# Altium footprint library 1437566-3.PcbLib: 1 footprints
Each footprint in its own frame and in the unit in brackets; x right, y up, seen from the top. Pads: shape width x height; smd on the part's side, far side on the other; paste and mask are expansions set on the pad; w line width, h text height; cw(c..) or ccw(c..) is an arc to the next point about the centre after c.
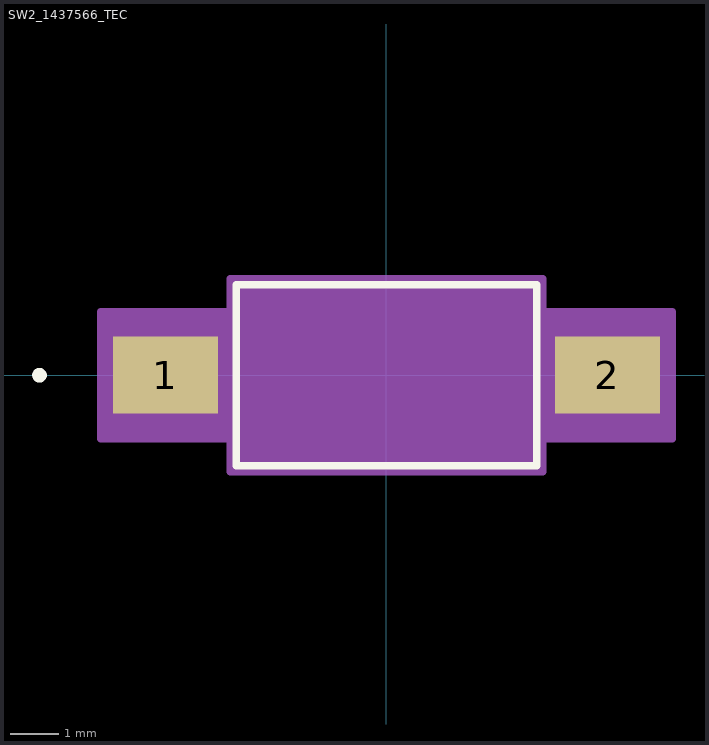
[diagram p0: the footprint, top view; thin cyan lines are the x and y axes]

## SW2_1437566_TEC [mil]
pads (2):
  rect 86x63 smd paste+0 mask+0: 1(-181,0) 2(181,0)
Top Overlay:
  circle w6: c-284,0 r3
  lines w6: -123,-74 -123,74 123,74 123,-74 -123,-74
Mechanical 13:
  circle w1: c-108,0 r3
  lines w1: -12,69 ccw(c0,69) 12,69 ; -118,-69 -118,69 118,69 118,-69 -118,-69
Mechanical 15:
  region: -128,-52 -234,-52 -234,52 -128,52 -128,79 128,79 128,52 234,52 234,-52 128,-52 128,-79 -128,-79
  lines w6: -234,-52 -128,-52 -128,-79 128,-79 128,-52 234,-52 234,52 128,52 128,79 -128,79 -128,52 -234,52 -234,-52